# Altium footprint library PcbLib1 indutor.PcbLib: 1 footprints
Each footprint in its own frame and in the unit in brackets; x right, y up, seen from the top. Pads: shape width x height; smd on the part's side, far side on the other; paste and mask are expansions set on the pad; w line width, h text height; cw(c..) or ccw(c..) is an arc to the next point about the centre after c.
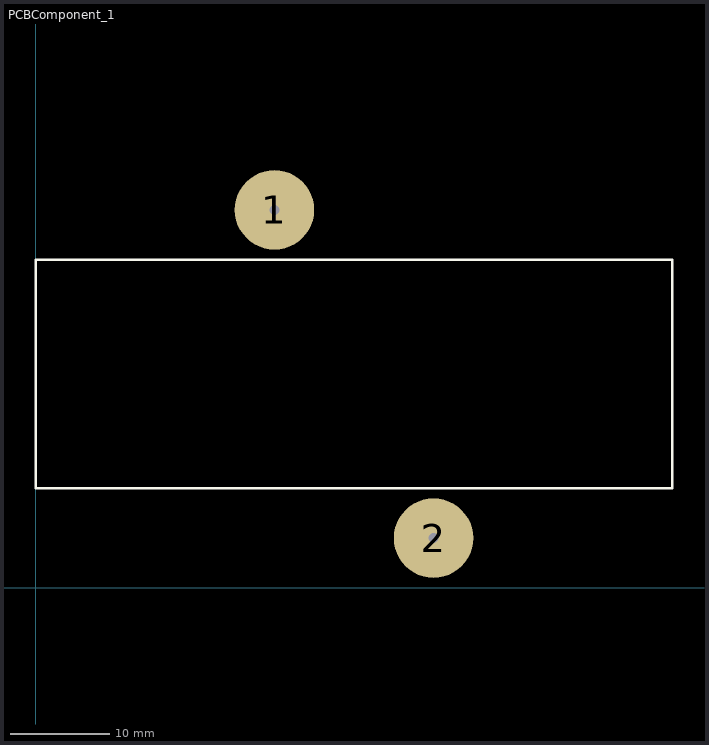
[diagram p0: the footprint, top view; thin cyan lines are the x and y axes]

## PCBComponent_1 [mm]
pads (2):
  round 8 hole 1: 1(24,38) 2(40,5)
Top Overlay:
  lines w0.254: 0,10 64,10 64,20 64,33 0,33 0,20 0,10